# Altium footprint library TitansLib.PcbLib: 333 footprints (part 10 of 21)
Each footprint in its own frame and in the unit in brackets; x right, y up, seen from the top. Pads: shape width x height; smd on the part's side, far side on the other; paste and mask are expansions set on the pad; w line width, h text height; cw(c..) or ccw(c..) is an arc to the next point about the centre after c.
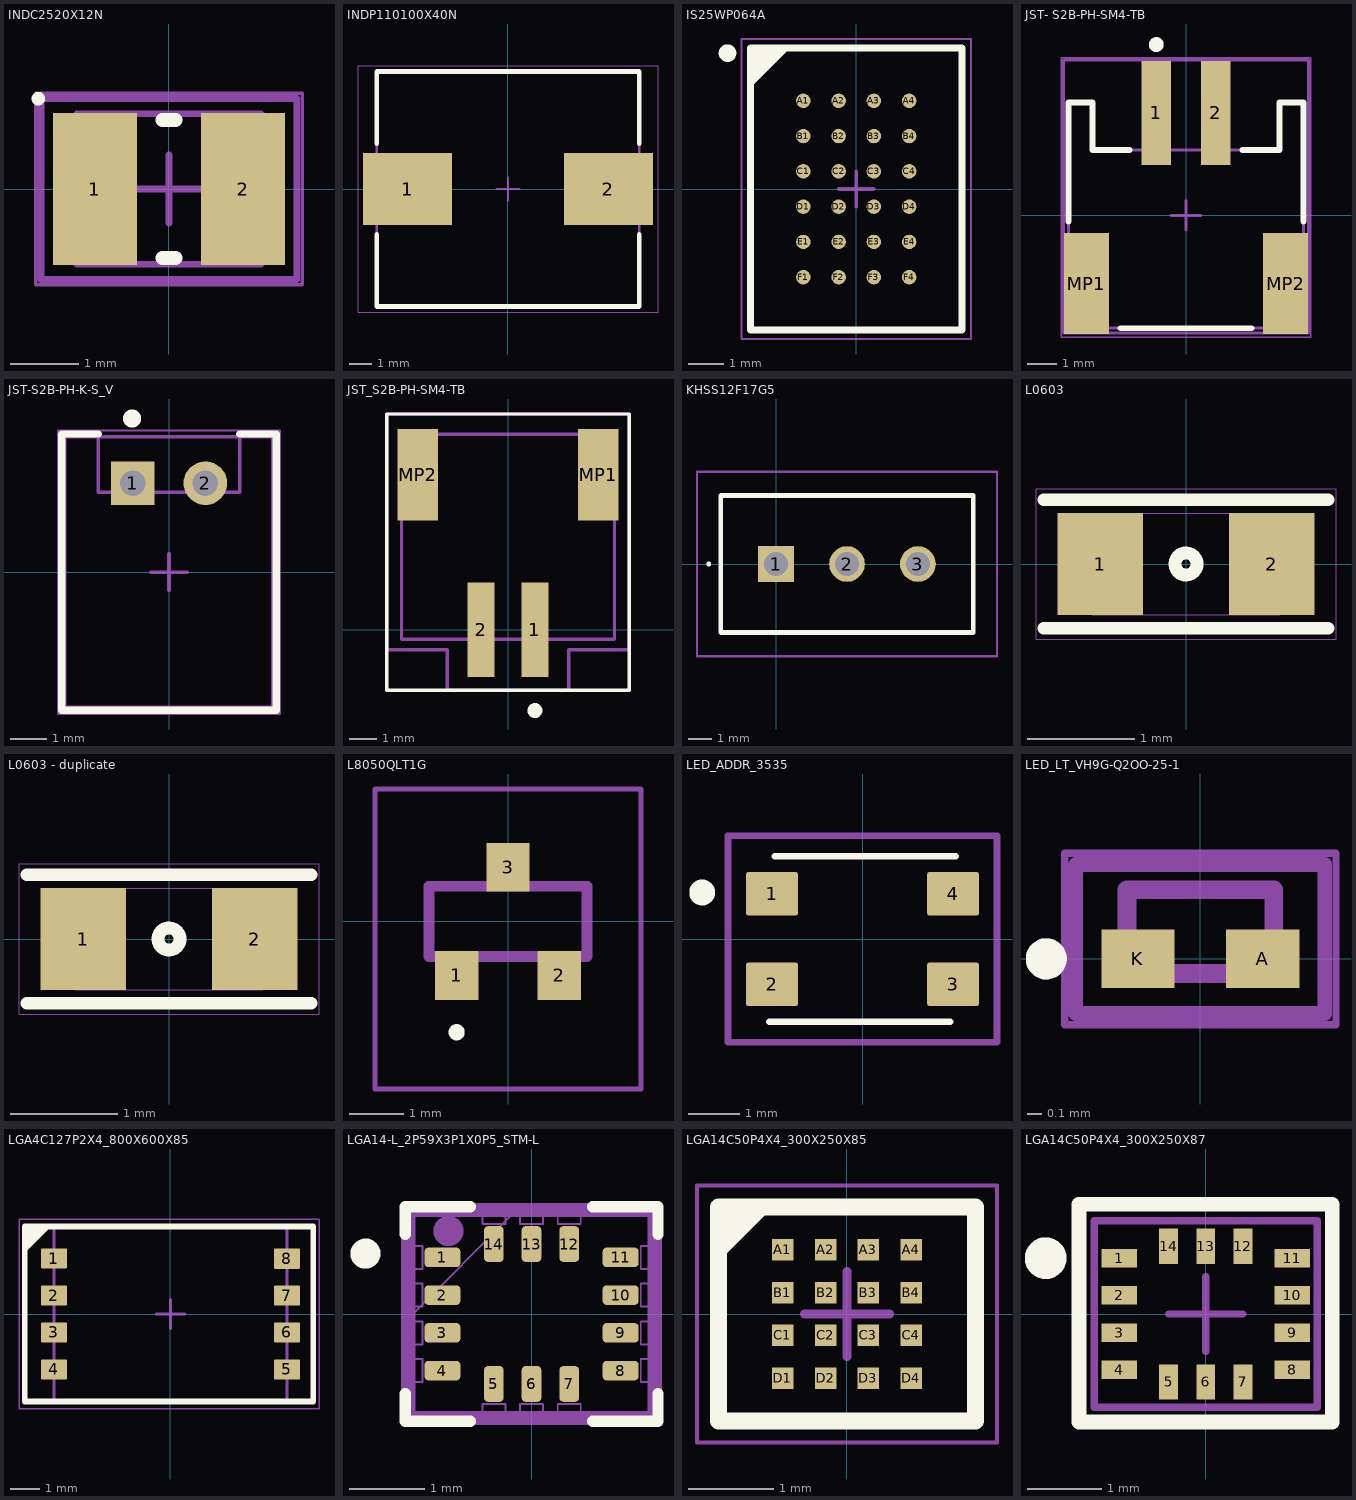
[diagram p9: the footprints below, top view; thin cyan lines are the x and y axes]

## INDC2520X12N [mm] "Chip Inductor, 2-Leads, Body 2.50x2.00mm, IPC Medium Density"
height 1.2
pads (2):
  rect 1.23x2.22 smd: 1(-1.085,0) 2(1.085,0)
Top Overlay:
  circle w0.1: c-1.912,1.322 r0.05
  lines w0.2: -0.1,-1.01 0.1,-1.01 ; -0.1,1.01 0.1,1.01
Top Assembly:
  lines w0.1: -1.872,-1.323 1.87,-1.323 1.87,1.323 -1.872,1.323 -1.872,-1.323
  text ".Designator" at -1.7,-0.175 h1
Mechanical 13:
  lines w0.1: -1.35,-1.1 -1.35,1.1 1.35,1.1 1.35,-1.1 -1.35,-1.1
Mechanical 15:
  lines w0.05: -1.95,-1.4 -1.95,1.4 1.95,1.4 1.95,-1.4 -1.95,-1.4
  lines w0.1: -0.5,0 0.5,0 ; 0,-0.5 0,0.5
3D body: height 1.2, standoff 0, extent -0.75,-1.1 0.75,1.1
3D body: height 1.2, standoff 0, extent -1.35,-1.1 -0.75,1.1
3D body: height 1.2, standoff 0, extent 0.75,-1.1 1.35,1.1

## INDP110100X40N [mm] "Precision Wire Wound Inductor, 2-Leads, Body 11.00x10.00mm, IPC Medium Density"
height 4
pads (2):
  rect 3.9x3.15 smd: 1(-4.4,0) 2(4.4,0)
Top Overlay:
  lines w0.2: -5.75,-1.975 -5.75,-5.15 5.75,-5.15 5.75,-1.975 ; -5.75,1.975 -5.75,5.15 5.75,5.15 5.75,1.975
Top Courtyard:
  lines w0.05: -6.575,-5.4 6.575,-5.4 6.575,5.4 -6.575,5.4 -6.575,-5.4
  lines w0.1: -0.5,0 0.5,0 ; 0,-0.5 0,0.5
Top Assembly:
  lines w0.1: -5.75,-5.15 5.75,-5.15 5.75,5.15 -5.75,5.15 -5.75,-5.15
  text ".Designator" at -1.975,-0.562 h1
3D body: height 4, standoff 0, extent -5.75,-5.15 5.75,5.15

## IS25WP064A [mm] "BGA, 24-Leads, Body 6,00x8,00mmx1,20mm, Pitch 1,00mm"
height 1.2
pads (24):
  round 0.41 smd: A1(-1.5,2.5) A2(-0.5,2.5) A3(0.5,2.5) A4(1.5,2.5) B1(-1.5,1.5) B2(-0.5,1.5) B3(0.5,1.5) B4(1.5,1.5) C1(-1.5,0.5) C2(-0.5,0.5) C3(0.5,0.5) C4(1.5,0.5) D1(-1.5,-0.5) D2(-0.5,-0.5) D3(0.5,-0.5) D4(1.5,-0.5) E1(-1.5,-1.5) E2(-0.5,-1.5) E3(0.5,-1.5) E4(1.5,-1.5) F1(-1.5,-2.5) F2(-0.5,-2.5) F3(0.5,-2.5) F4(1.5,-2.5)
Top Overlay:
  circle w0.25: c-3.65,3.85 r0.125
  region: -2,4 -3,3 -3,4
  lines w0.2: -3,3 -2,4 ; -3,-4 -3,4 3,4 3,-4 -3,-4
Top Courtyard:
  lines w0.05: -3.25,-4.25 -3.25,4.25 3.25,4.25 3.25,-4.25 -3.25,-4.25
  lines w0.1: -0.5,0 0.5,0 ; 0,-0.5 0,0.5
Top Assembly:
  lines w0.1: -3,-4 -3,4 3,4 3,-4 -3,-4
3D body "IS25WP064A.step": height 1.2, standoff 0, extent -3,-4 3,4

## JST- S2B-PH-SM4-TB [mm] "SMD, 2-Leads, Body 7.9x7.6mm, Pitch 2mm"
height 5.5
pads (4):
  rect 1x3.5 smd: 1(-1,3.45) 2(1,3.45)
  rect 1.5x3.4 smd: MP1(-3.35,-2.3) MP2(3.35,-2.3)
Top Overlay:
  circle w0.25: c-1,5.75 r0.125
  lines w0.2: -3.95,-0.2 -3.95,3.8 -3.15,3.8 -3.15,2.2 -1.9,2.2 ; -2.2,-3.8 2.2,-3.8 ; 1.9,2.2 3.15,2.2 3.15,3.8 3.95,3.8 3.95,-0.2
Top Assembly:
  lines w0.1: -4.123,-3.957 4.123,-3.957 4.123,5.223 -4.123,5.223 -4.123,-3.957
  text ".Designator" at -1.8,0.313 h1
Mechanical 13:
  lines w0.1: -3.95,-3 -3.95,3.8 -3.15,3.8 -3.15,2.2 3.15,2.2 3.15,3.8 3.95,3.8 3.95,-3 3.45,-3 3.45,-3.8 -3.45,-3.8 -3.45,-3 -3.95,-3
Mechanical 15:
  lines w0.05: -4.2,-4.1 4.2,-4.1 4.2,5.3 -4.2,5.3 -4.2,-4.1
  lines w0.1: -0.5,0 0.5,0 ; 0,-0.5 0,0.5
3D body "S2B-PH-SM4-TB.STEP": height 5.6, standoff 0, extent -3.95,-3.8 3.95,4.8

## JST-S2B-PH-K-S_V [mm] "THD, 2-Leads, Body 7.6x5.9mm, Pitch 2mm"
height 4.8
pads (2):
  rect 1.2x1.2 hole 0.7: 1(-1,2.45)
  round 1.2 hole 0.7: 2(1,2.45)
Top Overlay:
  circle w0.25: c-1.016,4.228 r0.125
  lines w0.2: -1.95,3.8 -2.95,3.8 -2.95,-3.8 2.95,-3.8 2.95,3.8 1.95,3.8
Top Assembly:
  lines w0.1: -2.873,-3.712 2.855,-3.712 2.855,3.723 -2.873,3.723 -2.873,-3.712
  text ".Designator" at -1.9,-0.887 h1
Mechanical 13:
  lines w0.1: -2.95,-3.8 2.95,-3.8 2.95,3.8 1.95,3.8 1.95,2.2 -1.95,2.2 -1.95,3.8 -1.95,3.8 -2.95,3.8 -2.95,-3.8
Mechanical 15:
  lines w0.05: -3.05,-3.9 -3.05,3.9 3.05,3.9 3.05,-3.9 -3.05,-3.9
  lines w0.1: -0.5,0 0.5,0 ; 0,-0.5 0,0.5
3D body "S2B-PH-K-S.STEP": height 4.8, standoff -3.4, extent -2.95,-3.8 2.95,3.8

## JST_S2B-PH-SM4-TB [mm]
pads (4):
  rect 1x3.5 smd mask+0.05: 1(1,0) 2(-1,0)
  rect 1.5x3.4 smd mask+0.05: MP1(3.35,5.75) MP2(-3.35,5.75)
Top Overlay:
  circle w0.3: c1,-3 r0.127
  lines w0.127: -4.5,-2.25 -4.5,8 4.5,8 4.5,-2.25 2.25,-2.25 -2.25,-2.25 -4.5,-2.25
Mechanical 13:
  lines w0.127: -3.95,-0.35 -3.95,7.25 3.95,7.25 3.95,-0.35 -3.95,-0.35
Mechanical 15:
  lines w0.127: -4.5,-0.75 -2.25,-0.75 -2.25,-2.25 2.25,-2.25 2.25,-0.75 4.5,-0.75 4.5,8 -4.5,8 -4.5,-0.75
3D body "step_temp.STEP": height 5.61, standoff 0.01, extent -3.95,-1.1 3.95,7.5

## KHSS12F17G5 [mm]
pads (3):
  rect 1.515x1.515 hole 1.01: 1(0,0)
  round 1.515 hole 1.01: 2(3,0) 3(6,0)
Top Overlay:
  lines w0.1: -2.9,0 cw(c-2.85,0) -2.8,0 cw(c-2.85,0) -2.9,0
  lines w0.2: -2.35,-2.9 -2.35,2.9 8.35,2.9 8.35,-2.9 -2.35,-2.9
Mechanical 13:
  lines w0.1: -2.35,-2.9 -2.35,2.9 8.35,2.9 8.35,-2.9 -2.35,-2.9
Mechanical 15:
  lines w0.1: -3.35,-3.9 -3.35,3.9 9.35,3.9 9.35,-3.9 -3.35,-3.9
3D body "L-KLS7-SS-12F20A-G5.step": height 10.09, standoff -4.51, extent -2.25,-2.75 8.25,2.75

## L0603 [mm]
height 0.95
pads (2):
  rect 0.8x0.95 smd mask+0.05: 1(-0.8,0) 2(0.8,0)
Top Overlay:
  circle w0.12: c0,0 r0.103
  lines w0.12: -1.325,-0.6 1.325,-0.6 ; -1.325,0.6 1.325,0.6
Bottom 3D Body:
  lines w0.01: -0.875,-0.475 0.875,-0.475 0.875,0.475 -0.875,0.475 -0.875,-0.475
Bottom Courtyard:
  lines w0.01: -1.4,-0.7 1.4,-0.7 1.4,0.7 -0.3,0.7 -1.4,0.7 -1.4,-0.7
3D body "L0603.STEP": height 0.5, standoff 0, extent -0.8,-0.4 0.8,0.4
3D body: height 0.95, standoff 0, extent -0.874,-0.474 0.874,0.474

## L0603 - duplicate [mm]
height 0.95
pads (2):
  rect 0.8x0.95 smd mask+0.05: 1(-0.8,0) 2(0.8,0)
Top Overlay:
  circle w0.12: c0,0 r0.103
  lines w0.12: -1.325,-0.6 1.325,-0.6 ; -1.325,0.6 1.325,0.6
Bottom 3D Body:
  lines w0.01: -0.875,-0.475 0.875,-0.475 0.875,0.475 -0.875,0.475 -0.875,-0.475
Bottom Courtyard:
  lines w0.01: -1.4,-0.7 1.4,-0.7 1.4,0.7 -0.3,0.7 -1.4,0.7 -1.4,-0.7
3D body "L0603.STEP": height 0.5, standoff 0, extent -0.8,-0.4 0.8,0.4
3D body: height 0.95, standoff 0, extent -0.874,-0.474 0.874,0.474

## L8050QLT1G [mm]
pads (3):
  rect 0.8x0.9 smd: 1(-0.95,-1) 2(0.95,-1) 3(0,1)
Top Overlay:
  lines w0.2: -0.95,-2.1 cw(c-0.95,-2.05) -0.95,-2 ; -0.95,-2.1 ccw(c-0.95,-2.05) -0.95,-2 ; -0.95,-2.1 cw(c-0.95,-2.05) -0.95,-2
Mechanical 13:
  lines w0.2: -1.46,-0.65 1.46,-0.65 1.46,0.65 -1.46,0.65 -1.46,-0.65
Mechanical 15:
  lines w0.1: -2.46,-3.1 2.46,-3.1 2.46,2.45 -2.46,2.45 -2.46,-3.1
3D body "L8050QLT1G.stp": height 1.21, standoff 0, extent -1.46,-0.65 1.46,0.65

## LED_ADDR_3535 [mm]
pads (4):
  rrect11% 1x0.85 smd: 1(-1.75,0.875) 2(-1.75,-0.875) 3(1.75,-0.875) 4(1.75,0.875)
Top Overlay:
  circle w0.3: c-3.1,0.9 r0.1
  lines w0.127: -1.8,-1.6 1.7,-1.6 ; -1.7,1.6 1.8,1.6
Top Courtyard:
  lines w0.127: -2.6,-2 2.6,-2 2.6,2 -2.6,2 -2.6,-2
3D body "SMD3535 RGB.stp": height 1, standoff 0, extent -1.85,-1.75 1.85,1.75

## LED_LT_VH9G-Q2OO-25-1 [mm]
pads (2):
  rect 0.5x0.4 smd paste-1 mask+0.05: A(0.425,0) K(-0.425,0)
Top Overlay:
  circle w0.14: c-1.05,0 r0.07
Top Paste:
  region: -0.39,-0.015 -0.19,-0.015 -0.19,-0.185 -0.66,-0.185 -0.66,0.185 -0.39,0.185
  region: 0.66,-0.185 0.19,-0.185 0.19,-0.015 0.39,-0.015 0.39,0.185 0.66,0.185
Top Assembly:
  lines w0.1: -0.848,-0.373 0.848,-0.373 0.848,0.643 -0.848,0.643 -0.848,-0.373
  text ".Designator" at -0.838,-0.146 h1
Mechanical 13:
  circle w0.14: c-1.05,0 r0.07
  lines w0.127: -0.5,-0.1 0.5,-0.1 0.5,0.47 -0.5,0.47 -0.5,-0.1
Mechanical 15:
  lines w0.05: -0.925,-0.45 -0.925,0.72 0.925,0.72 0.925,-0.45 -0.925,-0.45
3D body "LR_VH9F-P2R1-1.stp": height 0.57, standoff 0, extent -0.501,-0.15 0.501,0.15

## LGA4C127P2X4_800X600X85 [mm] "LGA, 4-Leads, Body 8.00x6.00mmx0.85mm, Pitch 1.27mm"
height 0.85
pads (8):
  rrect15% 0.9x0.7 smd: 1(-4,1.905) 2(-4,0.635) 3(-4,-0.635) 4(-4,-1.905) 5(4,-1.905) 6(4,-0.635) 7(4,0.635) 8(4,1.9)
Top Overlay:
  region: -4,3.1 -5,2.1 -5,3.1
  lines w0.2: -5,-3 -5,3 4.9,3 4.9,-3 -5,-3
Top Courtyard:
  lines w0.05: -5.2,-3.25 -5.2,3.25 5.1,3.25 5.1,-3.25 -5.2,-3.25
  lines w0.1: -0.5,0 0.5,0 ; 0,-0.5 0,0.5
Top Assembly:
  lines w0.1: -4,-3 -4,3 4,3 4,-3 -4,-3
  text ".Designator" at -2.125,-0.037 h1
3D body: height 0.95, standoff 0.85, extent -4,-3 4,3

## LGA14-L_2P59X3P1X0P5_STM-L [mm]
pads (14):
  rrect40% 0.475x0.26 smd paste+0 mask+0.05: 1(-1.181,0.75) 2(-1.181,0.25) 3(-1.181,-0.25) 4(-1.181,-0.75) 8(1.181,-0.75) 9(1.181,-0.25) 10(1.181,0.25) 11(1.181,0.75)
  rrect40% 0.26x0.475 smd paste+0 mask+0.05: 5(-0.5,-0.927) 6(0,-0.927) 7(0.5,-0.927) 12(0.5,0.927) 13(0,0.927) 14(-0.5,0.927)
Top Overlay:
  circle w0.2: c-2.2,0.8 r0.1
  lines w0.152: -1.676,-1.059 -1.676,-1.422 -0.809,-1.422 ; -1.676,1.059 -1.676,1.422 -0.809,1.422 ; 0.809,-1.422 1.676,-1.422 1.676,-1.059 ; 0.809,1.422 1.676,1.422 1.676,1.059
Top Assembly:
  lines w0.1: -1.599,-1.345 1.599,-1.345 1.599,1.345 -1.599,1.345 -1.599,-1.345
  text ".Designator" at -1.383,-0.272 h1
Mechanical 13:
  circle w0.2: c-1.1,1.1 r0.1
  lines w0.025: -1.549,0.025 -0.279,1.295 ; -1.549,-1.295 1.549,-1.295 1.549,1.295 -1.549,1.295 -1.549,-1.295 ; -1.549,-0.902 -1.549,-0.598 -1.448,-0.598 -1.448,-0.902 -1.549,-0.902 ; -1.549,-0.402 -1.549,-0.098 -1.448,-0.098 -1.448,-0.402 -1.549,-0.402 ; -1.549,0.098 -1.549,0.402 -1.448,0.402 -1.448,0.098 -1.549,0.098 ; -1.549,0.598 -1.549,0.902 -1.448,0.902 -1.448,0.598 -1.549,0.598 ; -0.652,-1.295 -0.348,-1.295 -0.348,-1.194 -0.652,-1.194 -0.652,-1.295 ; -0.652,1.194 -0.348,1.194 -0.348,1.295 -0.652,1.295 -0.652,1.194 ; -0.152,-1.295 0.152,-1.295 0.152,-1.194 -0.152,-1.194 -0.152,-1.295 ; -0.152,1.194 0.152,1.194 0.152,1.295 -0.152,1.295 -0.152,1.194 ; 0.348,-1.295 0.652,-1.295 0.652,-1.194 0.348,-1.194 0.348,-1.295 ; 0.348,1.194 0.652,1.194 0.652,1.295 0.348,1.295 0.348,1.194 ; 1.448,-0.902 1.549,-0.902 1.549,-0.598 1.448,-0.598 1.448,-0.902 ; 1.448,-0.402 1.549,-0.402 1.549,-0.098 1.448,-0.098 1.448,-0.402 ; 1.448,0.098 1.549,0.098 1.549,0.402 1.448,0.402 1.448,0.098 ; 1.448,0.598 1.549,0.598 1.549,0.902 1.448,0.902 1.448,0.598
Mechanical 15:
  lines w0.152: -1.651,-1.397 -1.651,-0.979 -1.651,0.979 -1.651,1.397 -0.729,1.397 0.729,1.397 1.651,1.397 1.651,0.979 1.651,-0.979 1.651,-1.397 0.729,-1.397 -0.729,-1.397 -1.651,-1.397
3D body "LGA14-L_2P59X3P1X0P5_STM.step": height 0.87, standoff 0, extent -1.549,-1.295 1.549,1.295

## LGA14C50P4X4_300X250X85 [mm] "LGA, 14-Leads, Body 3.00x2.50mmx0.85mm, Pitch 0.50mm"
height 0.85
pads (16):
  rect 0.25x0.25 smd: A1(-0.75,0.75) A2(-0.25,0.75) A3(0.25,0.75) A4(0.75,0.75) B1(-0.75,0.25) B2(-0.25,0.25) B3(0.25,0.25) B4(0.75,0.25) C1(-0.75,-0.25) C2(-0.25,-0.25) C3(0.25,-0.25) C4(0.75,-0.25) D1(-0.75,-0.75) D2(-0.25,-0.75) D3(0.25,-0.75) D4(0.75,-0.75)
Top Overlay:
  region: -1,1.25 -1.5,0.75 -1.5,1.25
  lines w0.2: -1.5,0.75 -1,1.25 ; -1.5,-1.25 1.5,-1.25 1.5,1.25 -1.5,1.25 -1.5,-1.25
Top Courtyard:
  lines w0.05: -1.75,-1.5 1.75,-1.5 1.75,1.5 -1.75,1.5 -1.75,-1.5
  lines w0.1: -0.5,0 0.5,0 ; 0,-0.5 0,0.5
Top Assembly:
  lines w0.1: -1.5,-1.25 1.5,-1.25 1.5,1.25 -1.5,1.25 -1.5,-1.25
3D body: height 0.85, standoff 0.05, extent -1.5,-1.25 1.5,1.25

## LGA14C50P4X4_300X250X87 [mm] "LGA, 14-Leads, Body 3.00x2.50mmx0.87mm, Pitch 0.50mm"
height 0.87
pads (14):
  rect 0.475x0.25 smd mask+0.05: 1(-1.162,0.75) 2(-1.162,0.25) 3(-1.162,-0.25) 4(-1.162,-0.75) 8(1.162,-0.75) 9(1.162,-0.25) 10(1.162,0.25) 11(1.162,0.75)
  rect 0.25x0.475 smd mask+0.05: 5(-0.5,-0.913) 6(0,-0.913) 7(0.5,-0.913) 12(0.5,0.913) 13(0,0.913) 14(-0.5,0.913)
Top Overlay:
  circle w0.3: c-2.15,0.75 r0.13
  lines w0.2: -1.7,-1.45 1.7,-1.45 1.7,1.475 -1.7,1.475 -1.7,-1.45
Mechanical 13:
  lines w0.1: -1.5,-1.25 1.5,-1.25 1.5,1.25 -1.5,1.25 -1.5,-1.25
Mechanical 15:
  lines w0.05: -1.75,-1.5 1.75,-1.5 1.75,1.5 -1.75,1.5 -1.75,-1.5
  lines w0.1: -0.5,0 0.5,0 ; 0,-0.5 0,0.5
3D body "BMI323.step": height 0.88, standoff 0.01, extent -1.5,-1.25 1.5,1.25